# Altium footprint library Adafruit_TCS34725_Module.PcbLib: 1 footprints
Each footprint in its own frame and in the unit in brackets; x right, y up, seen from the top. Pads: shape width x height; smd on the part's side, far side on the other; paste and mask are expansions set on the pad; w line width, h text height; cw(c..) or ccw(c..) is an arc to the next point about the centre after c.
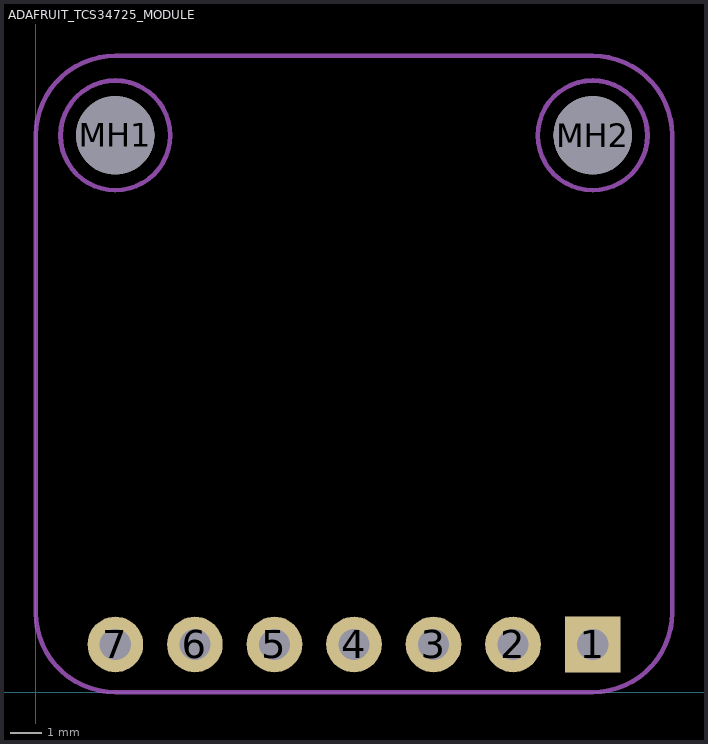
[diagram p0: the footprint, top view; thin cyan lines are the x and y axes]

## ADAFRUIT_TCS34725_MODULE [mil]
pads (9):
  rect 70x70 / inner round 64.67 / far side rect 70x70 hole 39.37: 1(700,60)
  round 70 hole 39.37: 2(600,60) 3(500,60) 4(400,60) 5(300,60) 6(200,60) 7(100,60)
  round 98.43 hole 98.43 unplated: MH1(100,700) MH2(700,700)
tDocu:
  circle w5.91: c700,700 r68.9
  circle w5.91: c100,700 r68.9
  lines w5.91: 0,100 ccw(c100,100) 100,0 700,0 ccw(c700,100) 800,100 800,700 ccw(c700,700) 700,800 100,800 ccw(c100,700) 0,700 0,100
tPlace:
  lines w5.91: 0,100 ccw(c100,100) 100,0 700,0 ccw(c700,100) 800,100 800,700 ccw(c700,700) 700,800 100,800 ccw(c100,700) 0,700 0,100
  text "LED" at 100,110.24 h39.66
  text "INT" at 200,110.24 h39.66
  text "SDA" at 300,110.24 h39.66
  text "SCL" at 400,110.24 h39.66
  text "3V3" at 500,110.24 h39.66
  text "GND" at 600,110.24 h39.66
  text "VIN" at 700,110.24 h39.66
3D body "Adafruit_TCS34725_Module.step": height 112.6, standoff -0.98, extent 0,0 800,800